# Altium schematic symbol library SM24CANB-02HTG.SchLib: 1 symbol
Pins are listed as number, name and electrical type; pins without a type are passive.

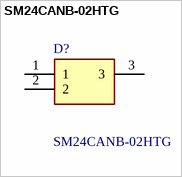
[diagram p0: symbol SM24CANB-02HTG]

## SM24CANB-02HTG
designator D?
2Channel 30KV 24V 500W TVS Diode Array; Manufacturer_Name: LITTELFUSE; Geometry.Height: 1.12mm; Manufacturer_Part_Number: SM24CANB-02HTG; Mouser Part Number: 576-SM24CANB-02HTG; Mouser Price/Stock: https://www.mouser.co.uk/ProductDetail/Littelfuse/SM24CANB-02HTG?qs=bWsWnctWn1wbKmCYlcUmHw%3D%3D; Arrow Part Number: SM24CANB-02HTG; Arrow Price/Stock: https://www.arrow.com/en/products/sm24canb-02htg/littelfuse.html?utm_currency=USD&region=asia; Datasheet Link: https://www.littelfuse.com/products/overvoltage-protection/tvs-diode-arrays/general-purpose/sm24canb/sm24canb-02htg
footprint SM24CANB02HTG
pins: 1, 2, 3